# Altium schematic symbol library NX32F001T-塑料壳扳手角磨链锯通用.SCHLIB: 53 symbols
Pins are listed as number, name and electrical type; pins without a type are passive.

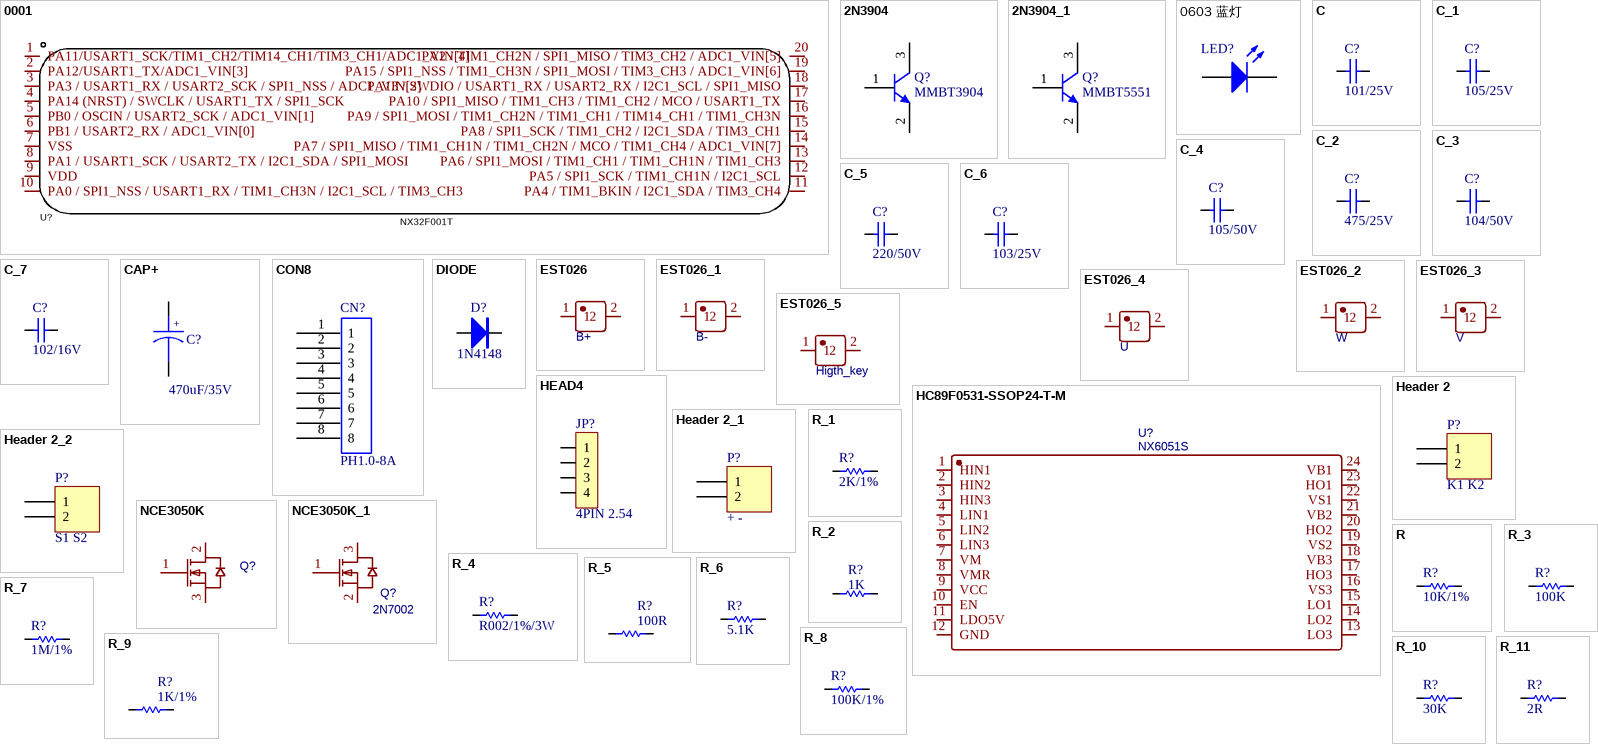
[diagram p0: symbols 0001 to R_11]

## 0001
designator U?, comment NX32F001T
主控IC; Manufacturer: MindMotion(灵动微); Name: MM32L073TW; Add into BOM: yes; CPU Core: CM0; Program Storage Size: 128KB; RAM Size: 8KB; GPIO Ports Number: 16; Operating Voltage Range: 2V~5.5V; CPU Maximum Speed: 48MHz; Program Memory Type: FLASH; ADC (Bit): 12bit; PWM (Bit): 16bit; 16Bit Timer: 4; 32Bit Timer: 1; Universal Serial Bus: 有; Peripheral/Function: 低电压检测；看门狗；CCP捕获/比较；片载温度传感器；DMA; Symbol: MM32L073TW; Device: MM32L073TW; LCSC Part Name: MM32L073TW; Supplier Part: C316706; Manufacturer Part: MM32L073TW; Supplier Footprint: ETSSOP20; JLCPCB Part Class: Extended Part; Datasheet: https://atta.szlcsc.com/upload/public/pdf/source/20181108/C316706_D58D5F47163545E30AD1B5FAEBB0C13E.pdf; Supplier: LCSC; Convert to PCB: yes; Operating Temperature Range: -; DAC (Bit): -; 8Bit Timer: -; CAN: 1; UART/USART: 1; I2C: 1; I2S: -; SPI: 1; Internal Comparator: 有; communication protocol: -; Watchdog: 有; Real-Time Clock: -; Infrared Data Association: -; Low-Voltage Detect: 有; CCP Capture/Compare: 有; Secure Digital Input and Output: -; Direct Memory Access: 有; Internal Oscillator: 有
footprint ETSSOP20_L6.5-W4.4-P0.65-LS6.4-BL
3D model ETSSOP-20_L6.5-W4.4-H1.2-LS6.4-P0.65
footprint TSSOP20_L6.5-W4.4-P0.65-LS6.4-BL
pins: 1 PA11/USART1_SCK/TIM1_CH2/TIM14_CH1/TIM3_CH1/ADC1_VIN[4], 2 PA12/USART1_TX/ADC1_VIN[3], 3 PA3 / USART1_RX / USART2_SCK / SPI1_NSS / ADC1_VIN[2], 4 PA14 (NRST) / SWCLK / USART1_TX / SPI1_SCK, 5 PB0 / OSCIN / USART2_SCK / ADC1_VIN[1], 6 PB1 / USART2_RX / ADC1_VIN[0], 7 VSS, 8 PA1 / USART1_SCK / USART2_TX / I2C1_SDA / SPI1_MOSI, 9 VDD, 10 PA0 / SPI1_NSS / USART1_RX / TIM1_CH3N / I2C1_SCL / TIM3_CH3, 11 PA4 / TIM1_BKIN / I2C1_SDA / TIM3_CH4, 12 PA5 / SPI1_SCK / TIM1_CH1N / I2C1_SCL, 13 PA6 / SPI1_MOSI / TIM1_CH1 / TIM1_CH1N / TIM1_CH3, 14 PA7 / SPI1_MISO / TIM1_CH1N / TIM1_CH2N / MCO / TIM1_CH4 / ADC1_VIN[7], 15 PA8 / SPI1_SCK / TIM1_CH2 / I2C1_SDA / TIM3_CH1, 16 PA9 / SPI1_MOSI / TIM1_CH2N / TIM1_CH1 / TIM14_CH1 / TIM1_CH3N, 17 PA10 / SPI1_MISO / TIM1_CH3 / TIM1_CH2 / MCO / USART1_TX, 18 PA13 / SWDIO / USART1_RX / USART2_RX / I2C1_SCL / SPI1_MISO, 19 PA15 / SPI1_NSS / TIM1_CH3N / SPI1_MOSI / TIM3_CH3 / ADC1_VIN[6], 20 PA2 / TIM1_CH2N / SPI1_MISO / TIM3_CH2 / ADC1_VIN[5]

## 2N3904
designator Q?, comment MMBT3904
NPN General Purpose Amplifier; Published: 8-Jun-2000; LatestRevisionDate: 15-Jan-2003; LatestRevisionNote: PCB Footprint 'BCY-W3/D4.7' replaced; DatasheetVersion: 1997; PackageVersion: Sep-1998; PackageReference: TO-92A; Publisher: Altium Limited; PackageDescription: TO, Flat Index; 3 In-Line, Axial Leads; Body Dia. 4.5mm; Leads 0.51 x 0.48 mm (max); ComponentLink1Description: Manufacturer Link; ComponentLink1URL: http://www.fairchildsemi.com/; ComponentLink2Description: Datasheet; ComponentLink2URL: http://www.fairchildsemi.com/ds/2N%2F2N3904.pdf
footprint TO-92A (TO, Flat Index; 3 In-Line, Axial Leads; Body Dia. 4.5mm; Leads 0.51 x 0.48 mm (max))
simulation model 2N3904 (NPN)
signal-integrity model 2N3904
footprint SOT-23B
footprint SOT-23-3
footprint LC-SOT-23(SOT-23-3)
pins: 1 B, 2 E, 3 C

## 2N3904_1
designator Q?, comment MMBT5551
NPN General Purpose Amplifier; Published: 8-Jun-2000; LatestRevisionDate: 15-Jan-2003; LatestRevisionNote: PCB Footprint 'BCY-W3/D4.7' replaced; DatasheetVersion: 1997; PackageVersion: Sep-1998; PackageReference: TO-92A; Publisher: Altium Limited; PackageDescription: TO, Flat Index; 3 In-Line, Axial Leads; Body Dia. 4.5mm; Leads 0.51 x 0.48 mm (max); ComponentLink1Description: Manufacturer Link; ComponentLink1URL: http://www.fairchildsemi.com/; ComponentLink2Description: Datasheet; ComponentLink2URL: http://www.fairchildsemi.com/ds/2N%2F2N3904.pdf
footprint TO-92A (TO, Flat Index; 3 In-Line, Axial Leads; Body Dia. 4.5mm; Leads 0.51 x 0.48 mm (max))
simulation model 2N3904 (NPN)
signal-integrity model 2N3904
footprint SOT-23B
footprint SOT-23-3
footprint LC-SOT-23(SOT-23-3)
pins: 1 B, 2 E, 3 C

## 0603 蓝灯
designator LED?
发光二极管; ComponentLink1Description: 供应商链接; ComponentLink1URL: http://www.szlcsc.com/product/details_73150.html; Package: 0603; Supplier: LC; SuppliersPartNumber: C72041
footprint LC-0603_LED_S1
footprint 0603_LED
pins: A, K

## C
designator C?, comment 101/25V
无极性电容; value: 100nF; volt: 16V
footprint C-0603
footprint C0603
footprint C0402
pins: 1, 2

## C_1
designator C?, comment 105/25V
无极性电容; value: 100nF; volt: 16V
footprint C-0603
footprint C0603
footprint C0402
pins: 1, 2

## C_2
designator C?, comment 475/25V
无极性电容; value: 100nF; volt: 16V
footprint C-0805
footprint C1206-M (贴片电容C)
footprint C0805
footprint 0805C
footprint C0603
pins: 1, 2

## C_3
designator C?, comment 104/50V
无极性电容; value: 100nF; volt: 16V
footprint C-0603
footprint C0603
footprint C0402
pins: 1, 2

## C_4
designator C?, comment 105/50V
无极性电容; value: 100nF; volt: 16V
footprint C-0805
footprint C1206-M (贴片电容C)
footprint C0805
footprint 0805C
footprint C0603
pins: 1, 2

## C_5
designator C?, comment 220/50V
无极性电容; value: 100nF; volt: 16V
footprint C-0603
footprint C0603
footprint C0402
pins: 1, 2

## C_6
designator C?, comment 103/25V
无极性电容; value: 100nF; volt: 16V
footprint C-0603
footprint C0603
footprint C0402
pins: 1, 2

## C_7
designator C?, comment 102/16V
无极性电容; value: 100nF; volt: 16V
footprint C-0603
footprint C0603
footprint C0402
pins: 1, 2

## CAP+
designator C?, comment 470uF/35V
直插电解电容
footprint CAP-SMD_BD10.0-L10.3-W10.3-LS11.3-FD
footprint EC D6*L11
footprint CAP-TH_BD10.0-P5.00-D0.6-FD
pins: 1, 2
text: +

## CON8
designator CN?, comment PH1.0-8A
8pin 开关贴片座子
footprint PH1.0-8A
footprint PH1.0-8A
pins: 1, 2, 3, 4, 5, 6, 7, 8
2 alternate drawings of the same symbol

## DIODE
designator D?, comment 1N4148
二极管
footprint SOD-323
footprint SOD-323
footprint SOD-123
footprint PF1-0035 (SOD-123，3.85*1.7*1.35mm)
footprint PT1-0069
footprint SOD-323A
pins: 1 A, 2 K
2 alternate drawings of the same symbol

## EST026
designator 1?, comment B+
接线插片; BOM_Manufacturer: xcfuse(旭程); BOM_Manufacturer Part: EST026; Contributor: LCSC; BOM_Supplier: LCSC; BOM_Supplier Part: C52878; BOM_JLCPCB Part Class: Extended Part; spicePre: U; spiceSymbolName: EST026
footprint CONN-TH_L6.3-W0.8-EST026
footprint PAD-16AWG (PTH for 16 AWG wire)
pins: 1, 2

## EST026_1
designator 2?, comment B-
接线插片; BOM_Manufacturer: xcfuse(旭程); BOM_Manufacturer Part: EST026; Contributor: LCSC; BOM_Supplier: LCSC; BOM_Supplier Part: C52878; BOM_JLCPCB Part Class: Extended Part; spicePre: U; spiceSymbolName: EST026
footprint CONN-TH_L6.3-W0.8-EST026
footprint PAD-16AWG (PTH for 16 AWG wire)
pins: 1, 2

## EST026_2
designator W?, comment W
接线插片; BOM_Manufacturer: xcfuse(旭程); BOM_Manufacturer Part: EST026; Contributor: LCSC; BOM_Supplier: LCSC; BOM_Supplier Part: C52878; BOM_JLCPCB Part Class: Extended Part; spicePre: U; spiceSymbolName: EST026
footprint CONN-TH_L6.3-W0.8-EST026
footprint CONN-TH_L6.3-W0.8-EST026
pins: 1, 2

## EST026_3
designator V?, comment V
接线插片; BOM_Manufacturer: xcfuse(旭程); BOM_Manufacturer Part: EST026; Contributor: LCSC; BOM_Supplier: LCSC; BOM_Supplier Part: C52878; BOM_JLCPCB Part Class: Extended Part; spicePre: U; spiceSymbolName: EST026
footprint CONN-TH_L6.3-W0.8-EST026
footprint CONN-TH_L6.3-W0.8-EST026
pins: 1, 2

## EST026_4
designator U?, comment U
接线插片; BOM_Manufacturer: xcfuse(旭程); BOM_Manufacturer Part: EST026; Contributor: LCSC; BOM_Supplier: LCSC; BOM_Supplier Part: C52878; BOM_JLCPCB Part Class: Extended Part; spicePre: U; spiceSymbolName: EST026
footprint CONN-TH_L6.3-W0.8-EST026
footprint CONN-TH_L6.3-W0.8-EST026
pins: 1, 2

## EST026_5
designator 3?, comment Higth_key
接线插片; BOM_Manufacturer: xcfuse(旭程); BOM_Manufacturer Part: EST026; Contributor: LCSC; BOM_Supplier: LCSC; BOM_Supplier Part: C52878; BOM_JLCPCB Part Class: Extended Part; spicePre: U; spiceSymbolName: EST026
footprint CONN-TH_L6.3-W0.8-EST026
footprint PAD-16AWG (PTH for 16 AWG wire)
pins: 1, 2

## HC89F0531-SSOP24-T-M
designator U?, comment NX6051S
合封驱动IC; BOM_Manufacturer: Shanghai Holychip Elec; BOM_Manufacturer Part: HC89F0531-SSOP24-T-M; Contributor: LCSC; BOM_Supplier: LCSC; BOM_Supplier Part: C710315; BOM_JLCPCB Part Class: Extended Part; spicePre: U; spiceSymbolName: HC89F0531-SSOP24-T-M
footprint SSOP-24_L8.8-W4.0-P0.64-LS6.2-BL
footprint SSOP-24_L8.8-W4.0-P0.64-LS6.2-BL
footprint SSOP-24_L8.8-W4.0-P0.64-LS6.2-BL
pins: 1 HIN1, 2 HIN2, 3 HIN3, 4 LIN1, 5 LIN2, 6 LIN3, 7 VM, 8 VMR, 9 VCC, 10 EN, 11 LDO5V, 12 GND, 13 LO3, 14 LO2, 15 LO1, 16 VS3, 17 HO3, 18 VB3, 19 VS2, 20 HO2, 21 VB2, 22 VS1, 23 HO1, 24 VB1

## HEAD4
designator JP?, comment value 4PIN 2.54  (hidden comment: + -DSD DSCK)
4PIN端子
footprint XH2.54-LI-4P (XH2.54)
footprint HEAD-4S-2.54
footprint HDR1X4 (Connector; Header; 4 Position)
footprint HDR-1X4 (排针，4脚)
footprint HDR1X4 (Connector; Header; 4 Position)
pins: 1, 2, 3, 4

## Header 2
designator P?, comment K1 K2
Header, 2-Pin; LatestRevisionDate: 17-Jul-2002; LatestRevisionNote: Re-released for DXP Platform.; Publisher: Altium Limited
footprint HDR1X2 (Connector; Header; 2 Position)
signal-integrity model Connector
pins: 1, 2

## Header 2_1
designator P?, comment + -
Header, 2-Pin; LatestRevisionDate: 17-Jul-2002; LatestRevisionNote: Re-released for DXP Platform.; Publisher: Altium Limited
footprint HDR1X2 (Connector; Header; 2 Position)
signal-integrity model Connector
pins: 1, 2

## Header 2_2
designator P?, comment S1 S2
Header, 2-Pin; LatestRevisionDate: 17-Jul-2002; LatestRevisionNote: Re-released for DXP Platform.; Publisher: Altium Limited
footprint HDR1X2 (Connector; Header; 2 Position)
signal-integrity model Connector
pins: 1, 2

## NCE3050K
designator Q?
N-Channel mosfet; BOM_Manufacturer: Ncepower; BOM_Manufacturer Part: NCE3050K; BOM_Supplier: LCSC; BOM_Supplier Part: C127863; BOM_JLCPCB Part Class: Extended Part; spicePre: Q; spiceSymbolName: NCE3050K
footprint TO-252-2_L6.6-W6.1-P4.57-LS10.1-TL-CW
footprint TO-252-2-180 (180度编带包装)
footprint TO-252-2-180 (180度编带包装)
pins: 1 G, 2 D, 3 S

## NCE3050K_1
designator Q?, comment 2N7002
N-Channel mosfet; BOM_Manufacturer: Ncepower; BOM_Manufacturer Part: NCE3050K; BOM_Supplier: LCSC; BOM_Supplier Part: C127863; BOM_JLCPCB Part Class: Extended Part; spicePre: Q; spiceSymbolName: NCE3050K
footprint TO-252-2_L6.6-W6.1-P4.57-LS10.1-TL-CW
footprint TO-252-2-180 (180度编带包装)
footprint TO-252-2-180 (180度编带包装)
footprint TOLL-8_L10.4-W9.9-P1.20-LS11.7-BL_2
footprint SOT23-3
footprint SOT-23-3
pins: 1 G, 2 S, 3 D

## R
designator R?, comment 10K/1%
贴片电阻; value: 10K 1%
footprint R0805-M (贴片电阻R)
footprint R-0603
footprint R0603
footprint R0402
pins: 1, 2

## R_1
designator R?, comment 2K/1%
贴片电阻; value: 10K 1%
footprint R0805-M (贴片电阻R)
footprint R-0603
footprint R0603
footprint R0402
pins: 1, 2

## R_2
designator R?, comment 1K
贴片电阻; value: 10K 1%
footprint R-0603
footprint R0603
footprint R0402
pins: 1, 2

## R_3
designator R?, comment 100K
贴片电阻; value: 10K 1%
footprint R-0603
footprint R0603
footprint R0402
pins: 1, 2

## R_4
designator R?, comment R002/1%/3W
贴片合金电阻; value: 10K 1%
footprint R-2512
footprint R2512 (贴片电阻R)
footprint R0402
footprint R2512 (贴片电阻R)
footprint R1206
footprint R 2512 (1W贴片电阻)
pins: 1, 2

## R_5
designator R?, comment 100R
贴片电阻; value: 10K 1%
footprint R-0603
footprint R0603
footprint R0402
pins: 1, 2

## R_6
designator R?, comment 5.1K
贴片电阻; value: 10K 1%
footprint R-0603
footprint R0603
footprint R0402
pins: 1, 2

## R_7
designator R?, comment 1M/1%
贴片电阻; value: 10K 1%
footprint R-0603
footprint R0603
footprint R0402
pins: 1, 2

## R_8
designator R?, comment 100K/1%
贴片电阻; value: 10K 1%
footprint R-0603
footprint R0603
footprint R0402
pins: 1, 2

## R_9
designator R?, comment 1K/1%
贴片电阻; value: 10K 1%
footprint R-0603
footprint R0603
footprint R0402
pins: 1, 2

## R_10
designator R?, comment 30K
贴片电阻; value: 10K 1%
footprint R-0603
footprint R0603
footprint R0402
pins: 1, 2

## R_11
designator R?, comment 2R
贴片电阻; value: 10K 1%
footprint R-0603
footprint R0603
footprint R0402
pins: 1, 2

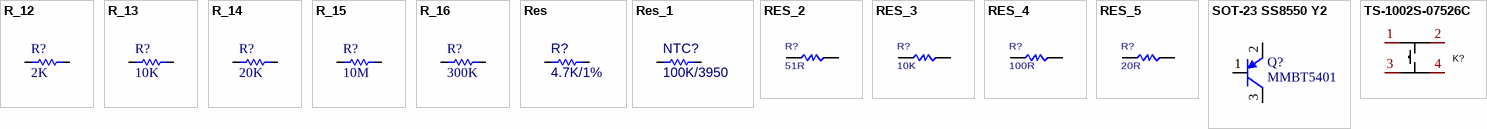
[diagram p1: symbols R_12 to TS-1002S-07526C]

## R_12
designator R?, comment 2K
贴片电阻; value: 10K 1%
footprint R-0603
footprint R0603
footprint R0402
pins: 1, 2

## R_13
designator R?, comment 10K
贴片电阻; value: 10K 1%
footprint R-0603
footprint R0603
footprint R0402
pins: 1, 2

## R_14
designator R?, comment 20K
贴片电阻; value: 10K 1%
footprint R-0603
footprint R0603
footprint R0402
pins: 1, 2

## R_15
designator R?, comment 10M
贴片电阻; value: 10K 1%
footprint R-0603
footprint R0603
footprint R0402
pins: 1, 2

## R_16
designator R?, comment 300K
贴片电阻; value: 10K 1%
footprint R-0603
footprint R0603
footprint R0402
pins: 1, 2

## Res
designator R?, comment 4.7K/1%
贴片电阻; Published: 8-Jun-2000; LatestRevisionDate: 17-Jul-2002; LatestRevisionNote: Re-released for DXP Platform.; Publisher: Altium Limited
simulation model RESISTOR (Resistor)
signal-integrity model Res
footprint R0603 (无丝印)
footprint R-0603
footprint R0402
pins: 1, 2

## Res_1
designator NTC?, comment 100K/3950
贴片热敏电阻; Published: 8-Jun-2000; LatestRevisionDate: 17-Jul-2002; LatestRevisionNote: Re-released for DXP Platform.; Publisher: Altium Limited
simulation model RESISTOR (Resistor)
signal-integrity model Res
footprint R0603 (无丝印)
footprint R-0603
footprint R0402
footprint R0603
pins: 1, 2

## RES_2
designator R?, comment 51R
贴片电阻
footprint 0603
footprint 0603SM
footprint R0603
footprint R0402
pins: 1, 2
2 alternate drawings of the same symbol

## RES_3
designator R?, comment 10K
贴片电阻
footprint 0603
footprint 0603SM
footprint R0603
footprint R0402
pins: 1, 2
2 alternate drawings of the same symbol

## RES_4
designator R?, comment 100R
贴片电阻
footprint 0603
footprint 0603SM
footprint 1206
footprint LC-1206_R
footprint LC-1206_R
footprint R0805
pins: 1, 2
2 alternate drawings of the same symbol

## RES_5
designator R?, comment 20R
贴片电阻
footprint 0603
footprint 0603SM
footprint 1206
footprint LC-1206_R
footprint LC-1206_R
footprint R0805
pins: 1, 2
2 alternate drawings of the same symbol

## SOT-23 SS8550 Y2
designator Q?, comment MMBT5401
PNP三极管; ComponentLink1Description: 供应商链接; ComponentLink1URL: http://www.szlcsc.com/product/details_9037.html; Package: SOT-23; Supplier: LC; SuppliersPartNumber: C8542
footprint LC-SOT-23(SOT-23-3)
footprint LC-SOT-23(SOT-23-3)
footprint SOT23-3
footprint SOT-23-3
pins: 1 B, 2 E, 3 C

## TS-1002S-07526C
designator K?
轻触按键; Symbol: TS-1002S-07526C; Designer: U?; Device: TS-1002S-07526C
 MODELTYPE=PCBLIB
footprint K2-1157SP-C4SB-01 - duplicate (6.4X6.0X3.1 mm)
footprint SW-SMD_4P-L6.0-W6.0-P4.50-LS9.0-2
footprint DOT6X6SMT
pins: 1, 2, 3, 4